# Altium integrated library RXM-433-LR.IntLib: 1 symbol
Pins are listed as number, name and electrical type; pins without a type are passive.

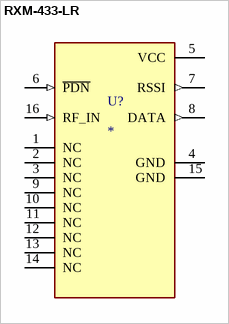
[diagram p0: symbol RXM-433-LR]

## RXM-433-LR
designator U?
MF: {'manufacturer': u'Linx Technologies'}; MP: RXM-433-LR; Package: None; Price: None; Value: *; Availability: Unavailable
footprint XCVR_RXM-433-LR
pins: 1 NC, 2 NC, 3 NC, 4 GND (power), 5 VCC (power), 6 ~{PDN} (in), 7 RSSI (out), 8 DATA (out), 9 NC, 10 NC, 11 NC, 12 NC, 13 NC, 14 NC, 15 GND (power), 16 RF_IN (in)